# Altium schematic symbol library PJ-320A.SchLib: 1 symbol
Pins are listed as number, name and electrical type; pins without a type are passive.

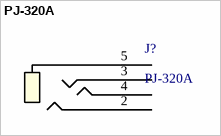
[diagram p0: symbol PJ-320A]

## PJ-320A
designator J?
Description; Manufacturer_Name: XKB Connectivity; Type: Power Connectors; Copyright: Copyright (C) 2026 Ultra Librarian. All rights reserved.; Manufacturer_Part_Number: PJ-320A; RefDes: RefDes
footprint JACK_PJ-320A_XKB
pins: 2, 3, 4, 5